# Altium footprint library AO3401A.PcbLib: 1 footprints
Each footprint in its own frame and in the unit in brackets; x right, y up, seen from the top. Pads: shape width x height; smd on the part's side, far side on the other; paste and mask are expansions set on the pad; w line width, h text height; cw(c..) or ccw(c..) is an arc to the next point about the centre after c.
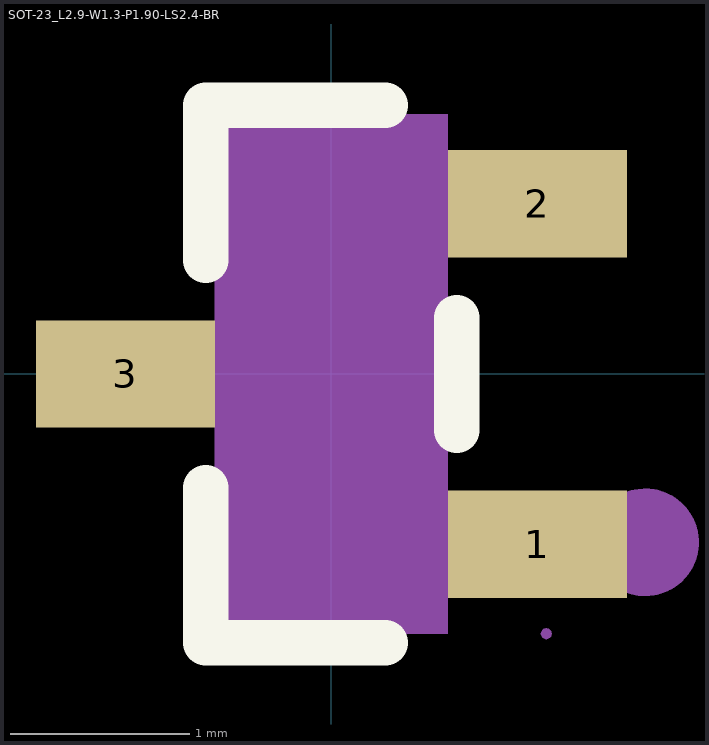
[diagram p0: the footprint, top view; thin cyan lines are the x and y axes]

## SOT-23_L2.9-W1.3-P1.90-LS2.4-BR [mm]
pads (3):
  rect 1x0.6 smd paste+0 mask+0.051: 1(1.15,-0.95) 2(1.15,0.95) 3(-1.15,0)
Top Overlay:
  lines w0.254: -0.7,-0.636 -0.7,-1.5 0.3,-1.5 ; -0.7,0.636 -0.7,1.5 0.3,1.5 ; 0.7,-0.314 0.7,0.314
Mechanical 5:
  circle w0.3: c1.753,-0.94 r0.15
Mechanical 9:
  region: -0.65,-1.45 -0.65,1.45 0.65,1.45 0.65,-1.45
Mechanical 10:
  region: -0.81,-0.2 -0.81,0.2 -0.64,0.2 -0.64,-0.2
  region: 0.64,0.75 0.64,1.15 0.81,1.15 0.81,0.75
  region: 0.64,-1.15 0.64,-0.75 0.81,-0.75 0.81,-1.15
Mechanical 11:
  region: 1.23,-1.45 1.23,-1.453 1.229,-1.459 1.227,-1.464 1.223,-1.469 1.219,-1.473 1.214,-1.477 1.209,-1.479 1.203,-1.48 1.197,-1.48 1.191,-1.479 1.186,-1.477 1.181,-1.473 1.177,-1.469 1.173,-1.464 1.171,-1.459 1.17,-1.453 1.17,-1.45 1.17,-1.447 1.171,-1.441 1.173,-1.436 1.177,-1.431 1.181,-1.427 1.186,-1.424 1.191,-1.421 1.197,-1.42 1.203,-1.42 1.209,-1.421 1.214,-1.424 1.219,-1.427 1.223,-1.431 1.227,-1.436 1.229,-1.441 1.23,-1.447 1.23,-1.45
Mechanical 12:
  region: -1.2,-0.2 -1.2,0.2 -0.8,0.2 -0.8,-0.2
  region: 0.8,0.75 0.8,1.15 1.2,1.15 1.2,0.75
  region: 0.8,-1.15 0.8,-0.75 1.2,-0.75 1.2,-1.15